# Altium footprint library BS_RFE_BB_20230506.PcbLib: 77 footprints (part 4 of 5)
Each footprint in its own frame and in the unit in brackets; x right, y up, seen from the top. Pads: shape width x height; smd on the part's side, far side on the other; paste and mask are expansions set on the pad; w line width, h text height; cw(c..) or ccw(c..) is an arc to the next point about the centre after c.
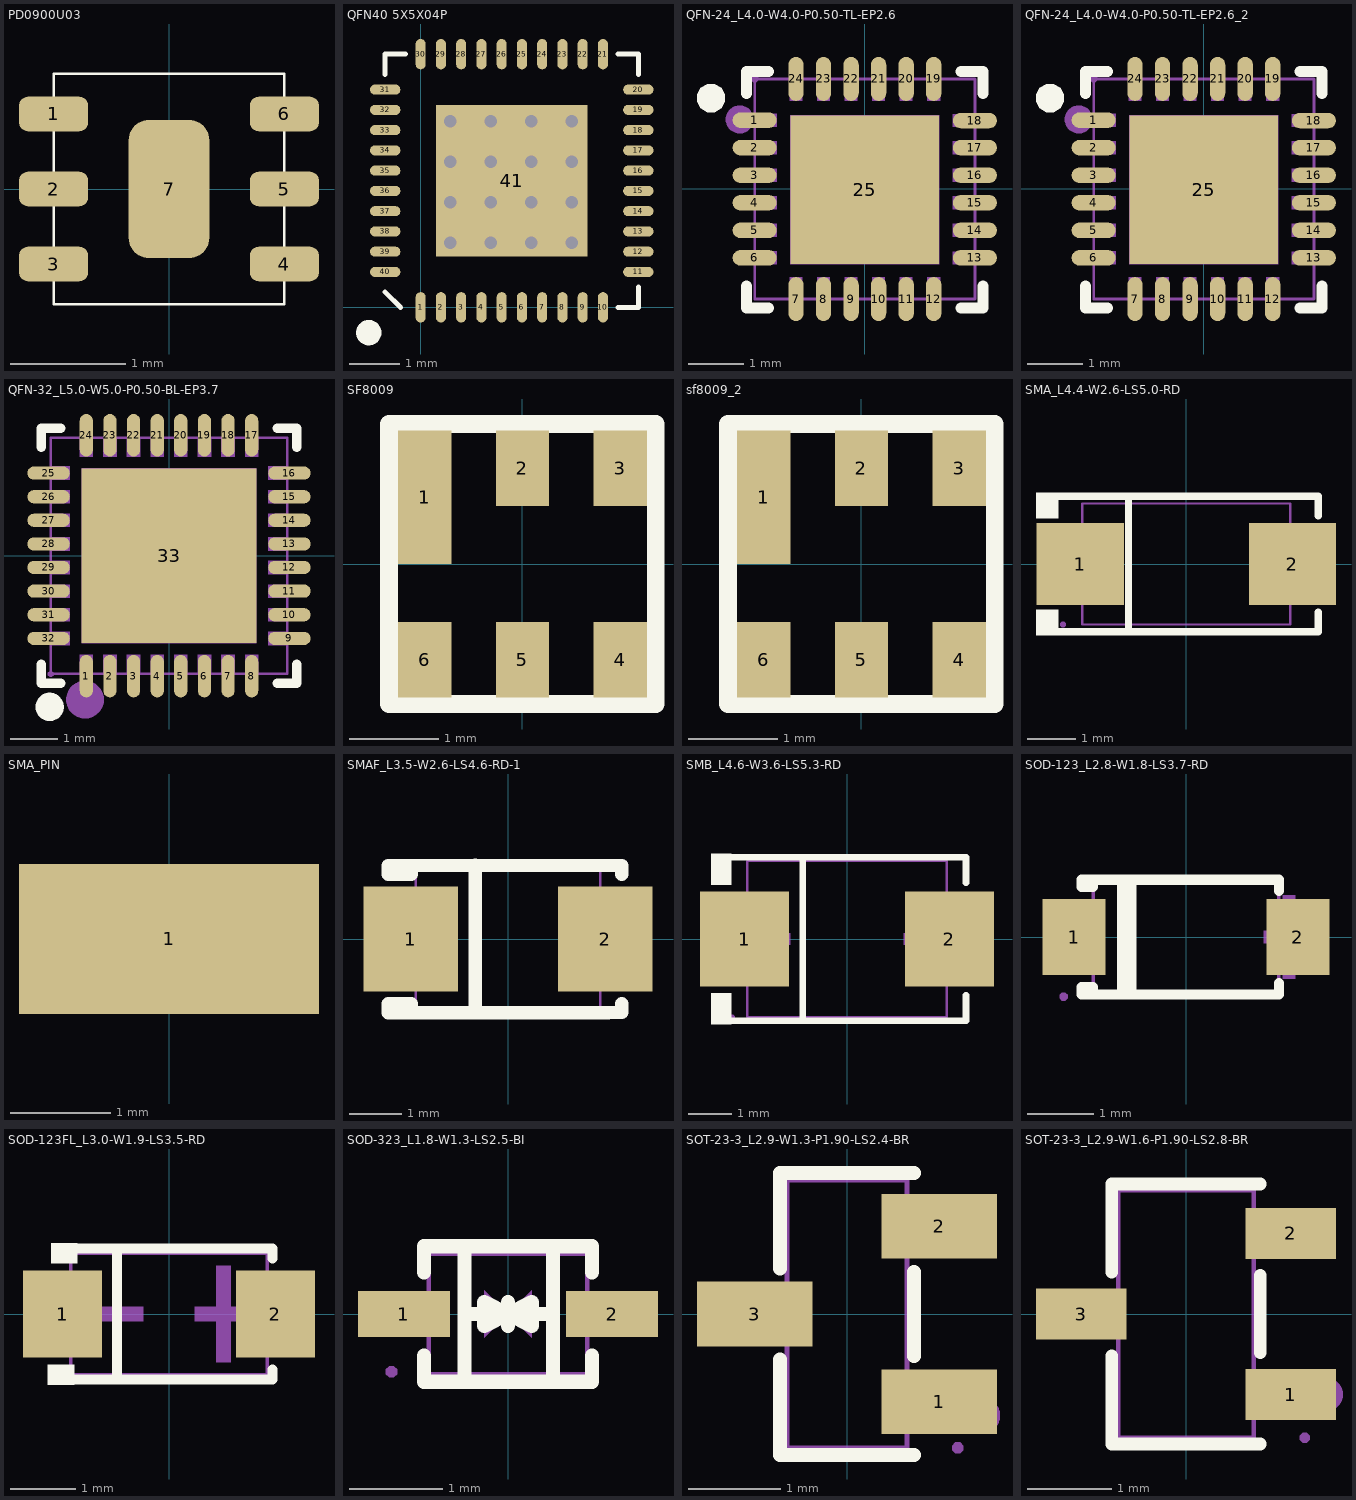
[diagram p3: the footprints below, top view; thin cyan lines are the x and y axes]

## PD0900U03 [mm]
pads (7):
  rrect50% 0.6x0.3 smd: 1(-1,0.65) 2(-1,0) 3(-1,-0.65) 4(1,-0.65) 5(1,0) 6(1,0.65)
  rrect50% 0.7x1.2 smd: 7(0,0)
Top Overlay:
  lines w0.02: -1,-1 1,-1 1,1 -1,1 -1,-1

## QFN40 5X5X04P [mm]
pads (41):
  oval 0.2x0.6 smd: 1(0,0) 2(0.4,0) 3(0.8,0) 4(1.2,0) 5(1.6,0) 6(2,0) 7(2.4,0) 8(2.8,0) 9(3.2,0) 10(3.6,0) 21(3.6,5) 22(3.2,5) 23(2.8,5) 24(2.4,5) 25(2,5) 26(1.6,5) 27(1.2,5) 28(0.8,5) 29(0.4,5) 30(0,5)
  oval 0.6x0.2 smd: 11(4.3,0.7) 12(4.3,1.1) 13(4.3,1.5) 14(4.3,1.9) 15(4.3,2.3) 16(4.3,2.7) 17(4.3,3.1) 18(4.3,3.5) 19(4.3,3.9) 20(4.3,4.3) 31(-0.7,4.3) 32(-0.7,3.9) 33(-0.7,3.5) 34(-0.7,3.1) 35(-0.7,2.7) 36(-0.7,2.3) 37(-0.7,1.9) 38(-0.7,1.5) 39(-0.7,1.1) 40(-0.7,0.7)
  rect 3x3 smd: 41(1.8,2.5)
via 2.983,1.278 diameter 0.4 hole 0.25
via 2.183,1.278 diameter 0.4 hole 0.25
via 1.383,1.278 diameter 0.4 hole 0.25
via 0.583,1.278 diameter 0.4 hole 0.25
via 2.983,2.078 diameter 0.4 hole 0.25
via 2.183,2.078 diameter 0.4 hole 0.25
via 1.383,2.078 diameter 0.4 hole 0.25
via 0.583,2.078 diameter 0.4 hole 0.25
via 2.983,2.878 diameter 0.4 hole 0.25
via 2.183,2.878 diameter 0.4 hole 0.25
via 1.383,2.878 diameter 0.4 hole 0.25
via 0.583,2.878 diameter 0.4 hole 0.25
via 2.983,3.678 diameter 0.4 hole 0.25
via 2.183,3.678 diameter 0.4 hole 0.25
via 1.383,3.678 diameter 0.4 hole 0.25
via 0.583,3.678 diameter 0.4 hole 0.25
Top Overlay:
  circle w0.25: c-1.025,-0.5 r0.125
  lines w0.1: -0.7,0.3 -0.4,0 ; -0.7,4.6 -0.7,5 -0.3,5 ; 3.9,0 4.3,0 4.3,0.4 ; 3.9,5 4.3,5 4.3,4.6
3D body: height 1, standoff 0, extent -0.686,0 4.293,4.978

## QFN-24_L4.0-W4.0-P0.50-TL-EP2.6 [mm]
pads (25):
  oval 0.8x0.28 smd mask+0.051: 1(-2,1.25) 2(-2,0.75) 3(-2,0.25) 4(-2,-0.25) 5(-2,-0.75) 6(-2,-1.25) 13(2,-1.25) 14(2,-0.75) 15(2,-0.25) 16(2,0.25) 17(2,0.75) 18(2,1.242)
  oval 0.28x0.8 smd mask+0.051: 7(-1.25,-2) 8(-0.75,-2) 9(-0.25,-2) 10(0.25,-2) 11(0.75,-2) 12(1.25,-2) 19(1.25,2) 20(0.75,2) 21(0.25,2) 22(-0.25,2) 23(-0.75,2) 24(-1.25,2)
  rect 2.7x2.7 smd mask+0.051: 25(0,-0.013)
Top Overlay:
  region: -2.792,1.397 -2.724,1.398 -2.607,1.466 -2.539,1.584 -2.54,1.72 -2.608,1.838 -2.726,1.905 -2.861,1.905 -2.979,1.838 -3.047,1.72 -3.048,1.584 -2.98,1.466 -2.863,1.398 -2.795,1.397
  lines w0.2: -2.15,-1.763 -2.15,-2.163 -1.75,-2.163 ; -2.15,1.737 -2.15,2.137 -1.75,2.137 ; 1.75,-2.163 2.15,-2.163 2.15,-1.763 ; 1.75,2.137 2.15,2.137 2.15,1.737
Top Paste:
  drawing of 25 lines, arcs and shapes, not listed
Mechanical 6:
  circle w0.254: c-2.273,1.263 r0.127
Mechanical 15:
  region: 1.135,2 1.365,2 1.365,1.6 1.135,1.6
  region: 0.635,2 0.865,2 0.865,1.6 0.635,1.6
  region: 0.135,2 0.365,2 0.365,1.6 0.135,1.6
  region: -0.365,2 -0.135,2 -0.135,1.6 -0.365,1.6
  region: -0.865,2 -0.635,2 -0.635,1.6 -0.865,1.6
  region: -1.365,2 -1.135,2 -1.135,1.6 -1.365,1.6
  region: -1.6,1.365 -1.6,1.135 -2,1.135 -2,1.365
  region: -1.6,0.865 -1.6,0.635 -2,0.635 -2,0.865
  region: -1.6,0.365 -1.6,0.135 -2,0.135 -2,0.365
  region: -1.6,-0.135 -1.6,-0.365 -2,-0.365 -2,-0.135
  region: -1.6,-0.635 -1.6,-0.865 -2,-0.865 -2,-0.635
  region: -1.6,-1.135 -1.6,-1.365 -2,-1.365 -2,-1.135
  region: -1.365,-1.6 -1.135,-1.6 -1.135,-2 -1.365,-2
  region: -0.865,-1.6 -0.635,-1.6 -0.635,-2 -0.865,-2
  region: -0.365,-1.6 -0.135,-1.6 -0.135,-2 -0.365,-2
  region: 0.135,-1.6 0.365,-1.6 0.365,-2 0.135,-2
  region: 0.635,-1.6 0.865,-1.6 0.865,-2 0.635,-2
  region: 1.135,-1.6 1.365,-1.6 1.365,-2 1.135,-2
  region: 2,-1.138 2,-1.368 1.6,-1.368 1.6,-1.138
  region: 2,-0.635 2,-0.865 1.6,-0.865 1.6,-0.635
  region: 2,-0.135 2,-0.365 1.6,-0.365 1.6,-0.135
  region: 2,0.365 2,0.135 1.6,0.135 1.6,0.365
  region: 2,0.865 2,0.635 1.6,0.635 1.6,0.865
  region: 2,1.357 2,1.127 1.6,1.127 1.6,1.357
  region: -1.35,1.337 1.35,1.337 1.35,-1.363 -1.35,-1.363
  region: -1.94,2 -1.94,2.025 -1.975,2.06 -2.025,2.06 -2.06,2.025 -2.06,2 -2.06,1.975 -2.025,1.94 -1.975,1.94 -1.94,1.975 -1.94,2
  lines w0.051: -2,-2 -2,2 2,2 2,-2 -2,-2

## QFN-24_L4.0-W4.0-P0.50-TL-EP2.6_2 [mm]
pads (25):
  oval 0.8x0.28 smd mask+0.051: 1(-2,1.25) 2(-2,0.75) 3(-2,0.25) 4(-2,-0.25) 5(-2,-0.75) 6(-2,-1.25) 13(2,-1.25) 14(2,-0.75) 15(2,-0.25) 16(2,0.25) 17(2,0.75) 18(2,1.242)
  oval 0.28x0.8 smd mask+0.051: 7(-1.25,-2) 8(-0.75,-2) 9(-0.25,-2) 10(0.25,-2) 11(0.75,-2) 12(1.25,-2) 19(1.25,2) 20(0.75,2) 21(0.25,2) 22(-0.25,2) 23(-0.75,2) 24(-1.25,2)
  rect 2.7x2.7 smd mask+0.051: 25(0,-0.013)
Top Overlay:
  region: -2.792,1.397 -2.724,1.398 -2.607,1.466 -2.539,1.584 -2.54,1.72 -2.608,1.838 -2.726,1.905 -2.861,1.905 -2.979,1.838 -3.047,1.72 -3.048,1.584 -2.98,1.466 -2.863,1.398 -2.795,1.397
  lines w0.2: -2.15,-1.763 -2.15,-2.163 -1.75,-2.163 ; -2.15,1.737 -2.15,2.137 -1.75,2.137 ; 1.75,-2.163 2.15,-2.163 2.15,-1.763 ; 1.75,2.137 2.15,2.137 2.15,1.737
Top Paste:
  drawing of 25 lines, arcs and shapes, not listed
Mechanical 6:
  circle w0.254: c-2.273,1.263 r0.127
Mechanical 15:
  region: -1.94,2 -1.94,2.025 -1.975,2.06 -2.025,2.06 -2.06,2.025 -2.06,2 -2.06,1.975 -2.025,1.94 -1.975,1.94 -1.94,1.975 -1.94,2
  region: -1.35,1.337 1.35,1.337 1.35,-1.363 -1.35,-1.363
  region: 2,1.357 2,1.127 1.6,1.127 1.6,1.357
  region: 2,0.865 2,0.635 1.6,0.635 1.6,0.865
  region: 2,0.365 2,0.135 1.6,0.135 1.6,0.365
  region: 2,-0.135 2,-0.365 1.6,-0.365 1.6,-0.135
  region: 2,-0.635 2,-0.865 1.6,-0.865 1.6,-0.635
  region: 2,-1.138 2,-1.368 1.6,-1.368 1.6,-1.138
  region: 1.135,-1.6 1.365,-1.6 1.365,-2 1.135,-2
  region: 0.635,-1.6 0.865,-1.6 0.865,-2 0.635,-2
  region: 0.135,-1.6 0.365,-1.6 0.365,-2 0.135,-2
  region: -0.365,-1.6 -0.135,-1.6 -0.135,-2 -0.365,-2
  region: -0.865,-1.6 -0.635,-1.6 -0.635,-2 -0.865,-2
  region: -1.365,-1.6 -1.135,-1.6 -1.135,-2 -1.365,-2
  region: -1.6,-1.135 -1.6,-1.365 -2,-1.365 -2,-1.135
  region: -1.6,-0.635 -1.6,-0.865 -2,-0.865 -2,-0.635
  region: -1.6,-0.135 -1.6,-0.365 -2,-0.365 -2,-0.135
  region: -1.6,0.365 -1.6,0.135 -2,0.135 -2,0.365
  region: -1.6,0.865 -1.6,0.635 -2,0.635 -2,0.865
  region: -1.6,1.365 -1.6,1.135 -2,1.135 -2,1.365
  region: -1.365,2 -1.135,2 -1.135,1.6 -1.365,1.6
  region: -0.865,2 -0.635,2 -0.635,1.6 -0.865,1.6
  region: -0.365,2 -0.135,2 -0.135,1.6 -0.365,1.6
  region: 0.135,2 0.365,2 0.365,1.6 0.135,1.6
  region: 0.635,2 0.865,2 0.865,1.6 0.635,1.6
  region: 1.135,2 1.365,2 1.365,1.6 1.135,1.6
  lines w0.051: -2,-2 2,-2 2,2 -2,2 -2,-2

## QFN-32_L5.0-W5.0-P0.50-BL-EP3.7 [mm]
pads (33):
  oval 0.28x0.9 smd paste-100 mask+0.05: 1(-1.75,-2.55) 2(-1.25,-2.55) 3(-0.749,-2.55) 4(-0.249,-2.55) 5(0.249,-2.55) 6(0.749,-2.55) 7(1.25,-2.55) 8(1.75,-2.55) 17(1.75,2.55) 18(1.25,2.55) 19(0.749,2.55) 20(0.249,2.55) 21(-0.249,2.55) 22(-0.749,2.55) 23(-1.25,2.55) 24(-1.75,2.55)
  oval 0.9x0.28 smd paste-100 mask+0.05: 9(2.55,-1.75) 10(2.55,-1.25) 11(2.55,-0.749) 12(2.55,-0.249) 13(2.55,0.249) 14(2.55,0.749) 15(2.55,1.25) 16(2.55,1.75) 25(-2.55,1.75) 26(-2.55,1.25) 27(-2.55,0.749) 28(-2.55,0.249) 29(-2.55,-0.249) 30(-2.55,-0.749) 31(-2.55,-1.25) 32(-2.55,-1.75)
  rect 3.7x3.7 smd paste-100 mask+0.05: 33(0,0)
Top Overlay:
  lines w0.2: -2.7,-2.295 -2.7,-2.7 -2.295,-2.7 ; -2.7,2.295 -2.7,2.7 -2.295,2.7 ; 2.295,-2.7 2.7,-2.7 2.7,-2.295 ; 2.295,2.7 2.7,2.7 2.7,2.295
  lines w0.3: -2.528,-3.05 ccw(c-2.527,-3.2) -2.525,-3.05
Top Paste:
  drawing of 33 lines, arcs and shapes, not listed
Mechanical 6:
  circle w0.4: c-1.778,-3.048 r0.2
Mechanical 15:
  drawing of 38 lines, arcs and shapes, not listed

## SF8009 [mm]
pads (6):
  rect 0.6x1.5 smd: 1(-1.1,0.75)
  rect 0.6x0.85 smd: 2(0,1.075) 3(1.1,1.075) 4(1.1,-1.075) 5(0,-1.075) 6(-1.1,-1.075)
Top Overlay:
  lines w0.2: -1.5,-1.575 1.5,-1.575 1.5,1.575 -1.5,1.575 -1.5,-1.575

## sf8009_2 [mm]
pads (6):
  rect 0.6x1.5 smd: 1(-1.1,0.75)
  rect 0.6x0.85 smd: 2(0,1.075) 3(1.1,1.075) 4(1.1,-1.075) 5(0,-1.075) 6(-1.1,-1.075)
Top Overlay:
  lines w0.2: -1.5,-1.575 -1.5,1.575 1.5,1.575 1.5,-1.575 -1.5,-1.575

## SMA_L4.4-W2.6-LS5.0-RD [mm]
pads (2):
  rect 1.8x1.7 smd paste+0 mask+0.051: 1(-2.192,0) 2(2.192,0)
Top Overlay:
  region: -2.65,1.477 -2.65,0.949 -3.107,0.949 -3.107,1.477
  region: -2.65,-1.477 -2.65,-0.949 -3.107,-0.949 -3.107,-1.477
  lines w0.152: -2.726,-1.401 2.726,-1.401 2.726,-1 ; -2.726,1.401 2.726,1.401 2.726,1 ; -1.197,-1.401 -1.197,1.401
Mechanical 6:
  region: -2.451,-0.099 -2.451,0.099 -1.656,0.099 -1.656,-0.099
  region: 2.451,-0.099 2.451,0.099 1.656,0.099 1.656,-0.099
  region: 2.153,-0.663 2.153,0.663 1.954,0.663 1.954,-0.663
Mechanical 15:
  region: -2.49,-1.25 -2.49,-1.225 -2.525,-1.19 -2.575,-1.19 -2.61,-1.225 -2.61,-1.25 -2.61,-1.275 -2.575,-1.31 -2.525,-1.31 -2.49,-1.275 -2.49,-1.25
  region: -1.35,0.725 -1.35,-0.725 -2.55,-0.725 -2.55,0.725
  region: 1.35,-0.725 1.35,0.725 2.55,0.725 2.55,-0.725
  lines w0.051: -2.15,-1.25 -2.15,1.25 2.15,1.25 2.15,-1.25 -2.15,-1.25

## SMA_PIN [mm]
pads (1):
  rect 3x1.5 smd: 1(0,5.093)

## SMAF_L3.5-W2.6-LS4.6-RD-1 [mm]
pads (2):
  rect 1.8x2 smd paste+0 mask+0.051: 1(-1.85,0) 2(1.85,0)
Top Overlay:
  lines w0.254: -2.027,-1.4 -2.027,-1.231 ; -2.027,1.397 -2.027,1.231 ; -1.84,-1.4 -1.84,-1.231 -2.027,-1.231 ; -1.84,1.397 -1.84,1.231 -2.027,1.231 ; -0.62,-1.4 -0.62,1.4 ; 1.91,-1.4 -1.89,-1.4 -2.276,-1.4 -2.276,-1.231 -2.027,-1.231 ; 1.91,-1.397 2.159,-1.397 2.159,-1.231 ; 2.159,1.231 2.159,1.397 1.915,1.397 -2.276,1.397 -2.276,1.231 -2.027,1.231
Mechanical 6:
  region: -2.667,0.127 -1.267,0.127 -1.267,-0.173 -2.667,-0.173
  region: 1.27,0.127 2.67,0.127 2.67,-0.173 1.27,-0.173
  region: 1.82,-0.723 1.82,0.677 2.12,0.677 2.12,-0.723
Mechanical 15:
  region: 2.3,-0.7 1.55,-0.7 1.55,0.7 2.3,0.7
  region: -1.55,-0.7 -2.3,-0.7 -2.3,0.7 -1.55,0.7
  region: -2.24,-1.3 -2.24,-1.275 -2.275,-1.24 -2.325,-1.24 -2.36,-1.275 -2.36,-1.3 -2.36,-1.325 -2.325,-1.36 -2.275,-1.36 -2.24,-1.325 -2.24,-1.3
  lines w0.051: -1.75,-1.3 1.75,-1.3 1.75,1.3 -1.75,1.3 -1.75,-1.3

## SMB_L4.6-W3.6-LS5.3-RD [mm]
pads (2):
  rect 2.047x2.192 smd paste+0 mask+0.051: 1(-2.361,0) 2(2.361,0)
Top Overlay:
  region: -2.668,-1.962 -2.668,-1.249 -3.125,-1.249 -3.125,-1.962
  region: -2.668,1.962 -2.668,1.249 -3.125,1.249 -3.125,1.962
  lines w0.152: -2.744,-1.886 2.744,-1.886 2.744,-1.299 ; -2.744,1.886 2.744,1.886 2.744,1.299 ; -1.016,-1.886 -1.016,1.886
Mechanical 6:
  region: 1.989,-0.905 1.989,0.905 1.717,0.905 1.717,-0.905
  region: 2.396,-0.136 2.396,0.136 1.31,0.136 1.31,-0.136
  region: -2.396,-0.136 -2.396,0.136 -1.31,0.136 -1.31,-0.136
Mechanical 15:
  region: 2.649,-1.015 2.649,1.015 1.509,1.015 1.509,-1.015
  region: -2.649,-1.015 -2.649,1.015 -1.509,1.015 -1.509,-1.015
  region: -2.59,-1.8 -2.59,-1.775 -2.625,-1.74 -2.674,-1.74 -2.709,-1.775 -2.709,-1.8 -2.709,-1.825 -2.674,-1.86 -2.625,-1.86 -2.59,-1.825 -2.59,-1.8
  lines w0.051: -2.3,-1.8 2.3,-1.8 2.3,1.8 -2.3,1.8 -2.3,-1.8

## SOD-123_L2.8-W1.8-LS3.7-RD [mm]
pads (2):
  rect 0.95x1.15 smd paste+0 mask+0.051: 1(-1.692,0) 2(1.692,0)
Top Overlay:
  lines w0.152: -0.97,-0.866 -0.97,0.866 ; -0.827,-0.866 -0.827,0.866 ; 1.406,-0.698 1.406,-0.866 -1.406,-0.866 ; 1.406,0.698 1.406,0.866 -1.406,0.866 ; -1.406,-0.866 -1.406,-0.755 -1.58,-0.755 -1.58,-0.866 -1.406,-0.866 ; -1.406,0.866 -1.406,0.755 -1.58,0.755 -1.58,0.866 -1.406,0.866
Mechanical 6:
  region: 1.651,0.635 1.651,-0.629 1.461,-0.629 1.461,0.635
  region: 1.935,0.098 1.935,-0.092 1.177,-0.092 1.177,0.098
  region: -2.03,0.095 -2.03,-0.095 -1.272,-0.095 -1.272,0.095
Mechanical 15:
  region: 1.851,-0.465 1.851,0.465 1.301,0.465 1.301,-0.465
  region: -1.851,-0.465 -1.851,0.465 -1.301,0.465 -1.301,-0.465
  region: -1.79,-0.9 -1.79,-0.875 -1.826,-0.84 -1.875,-0.84 -1.91,-0.875 -1.91,-0.9 -1.91,-0.925 -1.875,-0.96 -1.826,-0.96 -1.79,-0.925 -1.79,-0.9
  lines w0.051: -1.4,-0.9 1.4,-0.9 1.4,0.9 -1.4,0.9 -1.4,-0.9

## SOD-123FL_L3.0-W1.9-LS3.5-RD [mm]
pads (2):
  rect 1.208x1.33 smd paste+0 mask+0.051: 1(-1.624,0) 2(1.624,0)
Top Overlay:
  region: -1.4,1.077 -1.8,1.077 -1.8,0.777 -1.4,0.777
  region: -1.848,-1.077 -1.448,-1.077 -1.448,-0.777 -1.848,-0.777
  lines w0.152: -1.576,-1.001 1.576,-1.001 1.576,-0.845 ; -1.576,1.001 1.576,1.001 1.576,0.845 ; -0.791,-1.001 -0.791,1.001
Mechanical 6:
  region: 1.278,-0.111 1.278,0.111 0.39,0.111 0.39,-0.111
  region: -1.278,-0.111 -1.278,0.111 -0.39,0.111 -0.39,-0.111
  region: 0.945,-0.74 0.945,0.74 0.723,0.74 0.723,-0.74
Mechanical 15:
  region: 1.75,-0.475 1.12,-0.475 1.12,0.475 1.75,0.475
  region: -1.75,-0.475 -1.12,-0.475 -1.12,0.475 -1.75,0.475
  region: -1.69,-0.925 -1.69,-0.9 -1.725,-0.865 -1.775,-0.865 -1.81,-0.9 -1.81,-0.925 -1.81,-0.95 -1.775,-0.985 -1.725,-0.985 -1.69,-0.95 -1.69,-0.925
  lines w0.051: -1.5,-0.925 -1.5,0.925 1.5,0.925 1.5,-0.925 -1.5,-0.925

## SOD-323_L1.8-W1.3-LS2.5-BI [mm]
pads (2):
  rect 0.985x0.49 smd paste+0 mask+0.051: 1(-1.118,0) 2(1.118,0)
Top Overlay:
  lines w0.152: -0.901,-0.448 -0.901,-0.726 0.901,-0.726 0.901,-0.448 ; -0.901,0.448 -0.901,0.726 0.901,0.726 0.901,0.448 ; -0.467,-0.726 -0.467,0.726 ; 0.483,-0.726 0.483,0.726
  lines w0.154: -0.467,0 0.483,0.003 ; -0.127,0 0.003,0 0.254,0.127 0.254,-0.127 0.002,-0.003 ; -0.002,0.003 -0.254,0.127 -0.254,-0.127 -0.003,0 0.127,0 ; 0,-0.127 0,0.127
Mechanical 6:
  region: 0.254,-0.254 0.254,0.254 0,0
  region: -0.254,0.254 -0.254,-0.254 0,0
Mechanical 15:
  region: -1.25,-0.163 -1.25,0.163 -0.95,0.163 -0.95,-0.163
  region: -0.96,-0.163 -0.96,0.163 -0.84,0.163 -0.84,-0.163
  region: 0.95,-0.163 0.95,0.163 1.25,0.163 1.25,-0.163
  region: 0.84,-0.163 0.84,0.163 0.96,0.163 0.96,-0.163
  region: -1.19,-0.62 -1.19,-0.595 -1.225,-0.56 -1.275,-0.56 -1.31,-0.595 -1.31,-0.62 -1.31,-0.645 -1.275,-0.68 -1.225,-0.68 -1.19,-0.645 -1.19,-0.62
  lines w0.051: -0.85,-0.65 0.85,-0.65 0.85,0.65 -0.85,0.65 -0.85,-0.65

## SOT-23-3_L2.9-W1.3-P1.90-LS2.4-BR [mm]
pads (3):
  rect 1.25x0.7 smd paste+0 mask+0.051: 1(1,-0.95) 2(1,0.95) 3(-1,0)
Top Overlay:
  lines w0.152: -0.726,-0.495 -0.726,-1.526 0.726,-1.526 ; -0.726,0.495 -0.726,1.526 0.726,1.526 ; 0.726,-0.455 0.726,0.455
Mechanical 6:
  circle w0.2: c1.46,-1.1 r0.1
Mechanical 15:
  region: -1.2,-0.215 -1.2,0.215 -0.9,0.215 -0.9,-0.215
  region: -0.91,-0.215 -0.91,0.215 -0.64,0.215 -0.64,-0.215
  region: 0.9,-1.165 0.9,-0.735 1.2,-0.735 1.2,-1.165
  region: 0.64,-1.165 0.64,-0.735 0.91,-0.735 0.91,-1.165
  region: 0.9,0.735 0.9,1.165 1.2,1.165 1.2,0.735
  region: 0.64,0.735 0.64,1.165 0.91,1.165 0.91,0.735
  region: 1.26,-1.45 1.26,-1.425 1.225,-1.39 1.175,-1.39 1.14,-1.425 1.14,-1.45 1.14,-1.475 1.175,-1.51 1.225,-1.51 1.26,-1.475 1.26,-1.45
  lines w0.051: -0.65,-1.45 0.65,-1.45 0.65,1.45 -0.65,1.45 -0.65,-1.45

## SOT-23-3_L2.9-W1.6-P1.90-LS2.8-BR [mm]
pads (3):
  rect 1.07x0.6 smd mask+0.051: 1(1.235,-0.95) 2(1.235,0.95) 3(-1.235,0)
Top Overlay:
  lines w0.152: -0.876,-0.495 -0.876,-1.536 0.876,-1.536 ; -0.876,0.495 -0.876,1.536 0.876,1.536 ; 0.876,-0.455 0.876,0.455
Mechanical 6:
  circle w0.2: c1.651,-0.95 r0.1
Mechanical 15:
  region: 1.46,-1.46 1.46,-1.435 1.425,-1.4 1.375,-1.4 1.34,-1.435 1.34,-1.46 1.34,-1.485 1.375,-1.52 1.425,-1.52 1.46,-1.485 1.46,-1.46
  region: 0.95,-1.15 0.95,-0.75 1.4,-0.75 1.4,-1.15
  region: 0.79,-1.15 0.79,-0.75 0.96,-0.75 0.96,-1.15
  region: 0.95,0.75 0.95,1.15 1.4,1.15 1.4,0.75
  region: 0.79,0.75 0.79,1.15 0.96,1.15 0.96,0.75
  region: -0.95,-0.2 -0.95,0.2 -1.4,0.2 -1.4,-0.2
  region: -0.96,-0.2 -0.96,0.2 -0.79,0.2 -0.79,-0.2
  lines w0.051: -0.8,-1.46 -0.8,1.46 0.8,1.46 0.8,-1.46 -0.8,-1.46